# Altium schematic symbol library AO4406A.SchLib: 1 symbol
Pins are listed as number, name and electrical type; pins without a type are passive.

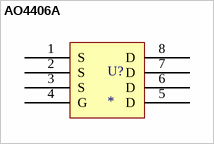
[diagram p0: symbol AO4406A]

## AO4406A
designator U?
N-Channel 30 V 13A (Ta) 3.1W (Ta) Surface Mount 8-SOIC
footprint SOIC127P600X175-8N
pins: 1 S, 2 S, 3 S, 4 G, 5 D, 6 D, 7 D, 8 D